# Altium footprint library Package_BGA.PcbLib: 230 footprints (part 14 of 28)
Each footprint in its own frame and in the unit in brackets; x right, y up, seen from the top. Pads: shape width x height; smd on the part's side, far side on the other; paste and mask are expansions set on the pad; w line width, h text height; cw(c..) or ccw(c..) is an arc to the next point about the centre after c.
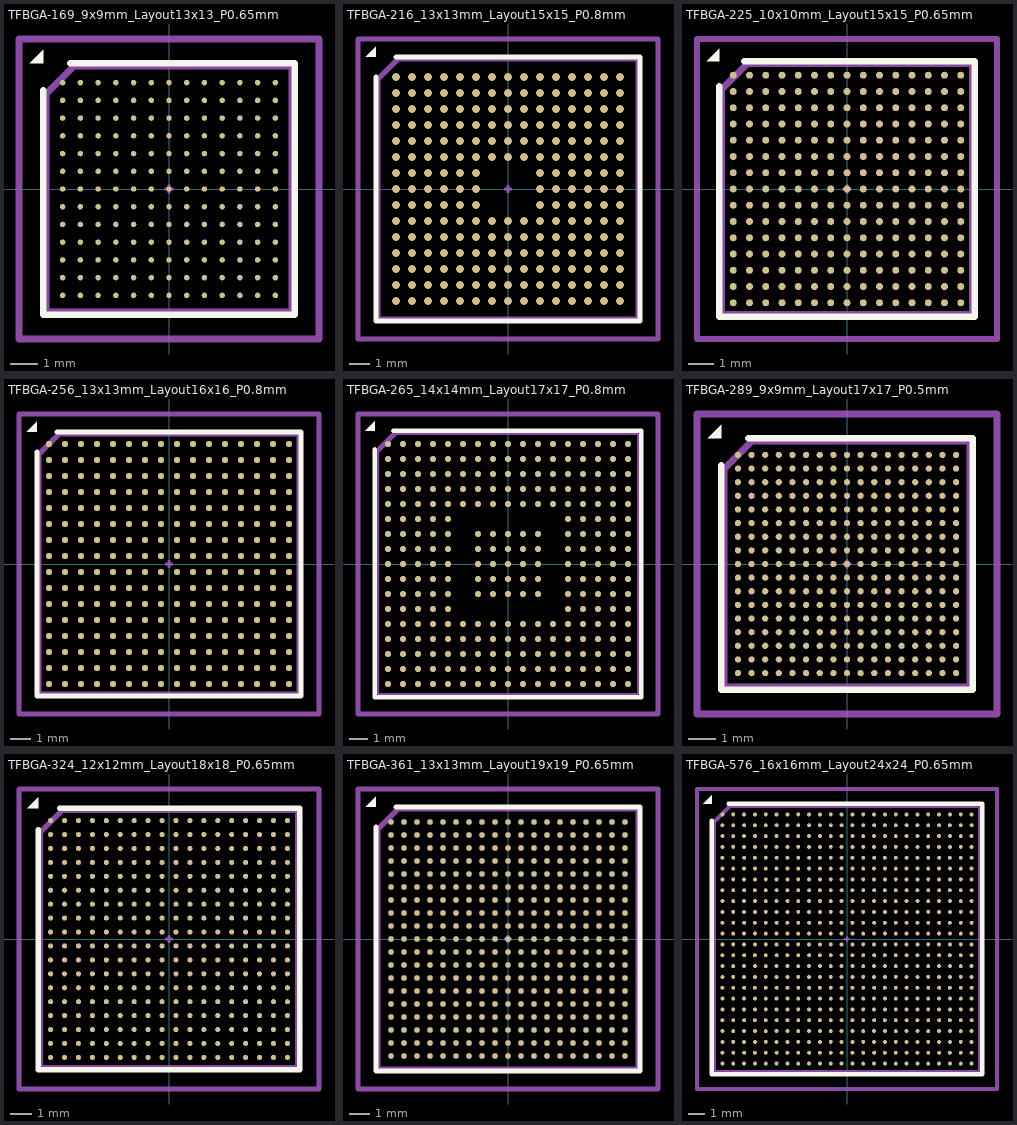
[diagram p13: the footprints below, top view; thin cyan lines are the x and y axes]

## TFBGA-169_9x9mm_Layout13x13_P0.65mm [mm] "TFBGA-169_9x9mm_Layout13x13_P0.65mm"
pads (169):
  round 0.2 smd: A1(-3.9,3.9) A2(-3.25,3.9) A3(-2.6,3.9) A4(-1.95,3.9) A5(-1.3,3.9) A6(-0.65,3.9) A7(0,3.9) A8(0.65,3.9) A9(1.3,3.9) A10(1.95,3.9) A11(2.6,3.9) A12(3.25,3.9) A13(3.9,3.9) B1(-3.9,3.25) B2(-3.25,3.25) B3(-2.6,3.25) B4(-1.95,3.25) B5(-1.3,3.25) B6(-0.65,3.25) B7(0,3.25) B8(0.65,3.25) B9(1.3,3.25) B10(1.95,3.25) B11(2.6,3.25) B12(3.25,3.25) B13(3.9,3.25) C1(-3.9,2.6) C2(-3.25,2.6) C3(-2.6,2.6) C4(-1.95,2.6) C5(-1.3,2.6) C6(-0.65,2.6) C7(0,2.6) C8(0.65,2.6) C9(1.3,2.6) C10(1.95,2.6) C11(2.6,2.6) C12(3.25,2.6) C13(3.9,2.6) D1(-3.9,1.95) D2(-3.25,1.95) D3(-2.6,1.95) D4(-1.95,1.95) D5(-1.3,1.95) D6(-0.65,1.95) D7(0,1.95) D8(0.65,1.95) D9(1.3,1.95) D10(1.95,1.95) D11(2.6,1.95) D12(3.25,1.95) D13(3.9,1.95) E1(-3.9,1.3) E2(-3.25,1.3) E3(-2.6,1.3) E4(-1.95,1.3) E5(-1.3,1.3) E6(-0.65,1.3) E7(0,1.3) E8(0.65,1.3) E9(1.3,1.3) E10(1.95,1.3) E11(2.6,1.3) E12(3.25,1.3) E13(3.9,1.3) F1(-3.9,0.65) F2(-3.25,0.65) F3(-2.6,0.65) F4(-1.95,0.65) F5(-1.3,0.65) F6(-0.65,0.65) F7(0,0.65) F8(0.65,0.65) F9(1.3,0.65) F10(1.95,0.65) F11(2.6,0.65) F12(3.25,0.65) F13(3.9,0.65) G1(-3.9,0) G2(-3.25,0) G3(-2.6,0) G4(-1.95,0) G5(-1.3,0) G6(-0.65,0) G7(0,0) G8(0.65,0) G9(1.3,0) G10(1.95,0) G11(2.6,0) G12(3.25,0) G13(3.9,0) H1(-3.9,-0.65) H2(-3.25,-0.65) H3(-2.6,-0.65) H4(-1.95,-0.65) H5(-1.3,-0.65) H6(-0.65,-0.65) H7(0,-0.65) H8(0.65,-0.65) H9(1.3,-0.65) H10(1.95,-0.65) H11(2.6,-0.65) H12(3.25,-0.65) H13(3.9,-0.65) J1(-3.9,-1.3) J2(-3.25,-1.3) J3(-2.6,-1.3) J4(-1.95,-1.3) J5(-1.3,-1.3) J6(-0.65,-1.3) J7(0,-1.3) J8(0.65,-1.3) J9(1.3,-1.3) J10(1.95,-1.3) J11(2.6,-1.3) J12(3.25,-1.3) J13(3.9,-1.3) K1(-3.9,-1.95) K2(-3.25,-1.95) K3(-2.6,-1.95) K4(-1.95,-1.95) K5(-1.3,-1.95) K6(-0.65,-1.95) K7(0,-1.95) K8(0.65,-1.95) K9(1.3,-1.95) K10(1.95,-1.95) K11(2.6,-1.95) K12(3.25,-1.95) K13(3.9,-1.95) L1(-3.9,-2.6) L2(-3.25,-2.6) L3(-2.6,-2.6) L4(-1.95,-2.6) L5(-1.3,-2.6) L6(-0.65,-2.6) L7(0,-2.6) L8(0.65,-2.6) L9(1.3,-2.6) L10(1.95,-2.6) L11(2.6,-2.6) L12(3.25,-2.6) L13(3.9,-2.6) M1(-3.9,-3.25) M2(-3.25,-3.25) M3(-2.6,-3.25) M4(-1.95,-3.25) M5(-1.3,-3.25) M6(-0.65,-3.25) M7(0,-3.25) M8(0.65,-3.25) M9(1.3,-3.25) M10(1.95,-3.25) M11(2.6,-3.25) M12(3.25,-3.25) M13(3.9,-3.25) N1(-3.9,-3.9) N2(-3.25,-3.9) N3(-2.6,-3.9) N4(-1.95,-3.9) N5(-1.3,-3.9) N6(-0.65,-3.9) N7(0,-3.9) N8(0.65,-3.9) N9(1.3,-3.9) N10(1.95,-3.9) N11(2.6,-3.9) N12(3.25,-3.9) N13(3.9,-3.9)
F.SilkS:
  region: -4.61,4.61 -5.11,4.61 -4.61,5.11
  lines w0.254: -4.61,3.61 -4.61,-4.61 4.61,-4.61 4.61,4.61 -3.61,4.61
Top Component Center:
  lines w0.127: -0.127,0 0.127,0 -0.127,0 ; 0,-0.127 0,0.127 0,-0.127
Top Assembly:
  lines w0.254: -4.5,-4.5 -4.5,3.5 -3.5,4.5 4.5,4.5 4.5,-4.5 -4.5,-4.5
Top Courtyard:
  lines w0.254: -5.5,-5.5 -5.5,5.5 5.5,5.5 5.5,-5.5 -5.5,-5.5
Top Designator:
  text ".Designator" at -3.432,-0.345 h1.52

## TFBGA-216_13x13mm_Layout15x15_P0.8mm [mm] "TFBGA-216_13x13mm_Layout15x15_P0.8mm"
pads (216):
  round 0.4 smd: A1(-5.6,5.6) A2(-4.8,5.6) A3(-4,5.6) A4(-3.2,5.6) A5(-2.4,5.6) A6(-1.6,5.6) A7(-0.8,5.6) A8(0,5.6) A9(0.8,5.6) A10(1.6,5.6) A11(2.4,5.6) A12(3.2,5.6) A13(4,5.6) A14(4.8,5.6) A15(5.6,5.6) B1(-5.6,4.8) B2(-4.8,4.8) B3(-4,4.8) B4(-3.2,4.8) B5(-2.4,4.8) B6(-1.6,4.8) B7(-0.8,4.8) B8(0,4.8) B9(0.8,4.8) B10(1.6,4.8) B11(2.4,4.8) B12(3.2,4.8) B13(4,4.8) B14(4.8,4.8) B15(5.6,4.8) C1(-5.6,4) C2(-4.8,4) C3(-4,4) C4(-3.2,4) C5(-2.4,4) C6(-1.6,4) C7(-0.8,4) C8(0,4) C9(0.8,4) C10(1.6,4) C11(2.4,4) C12(3.2,4) C13(4,4) C14(4.8,4) C15(5.6,4) D1(-5.6,3.2) D2(-4.8,3.2) D3(-4,3.2) D4(-3.2,3.2) D5(-2.4,3.2) D6(-1.6,3.2) D7(-0.8,3.2) D8(0,3.2) D9(0.8,3.2) D10(1.6,3.2) D11(2.4,3.2) D12(3.2,3.2) D13(4,3.2) D14(4.8,3.2) D15(5.6,3.2) E1(-5.6,2.4) E2(-4.8,2.4) E3(-4,2.4) E4(-3.2,2.4) E5(-2.4,2.4) E6(-1.6,2.4) E7(-0.8,2.4) E8(0,2.4) E9(0.8,2.4) E10(1.6,2.4) E11(2.4,2.4) E12(3.2,2.4) E13(4,2.4) E14(4.8,2.4) E15(5.6,2.4) F1(-5.6,1.6) F2(-4.8,1.6) F3(-4,1.6) F4(-3.2,1.6) F5(-2.4,1.6) F6(-1.6,1.6) F7(-0.8,1.6) F8(0,1.6) F9(0.8,1.6) F10(1.6,1.6) F11(2.4,1.6) F12(3.2,1.6) F13(4,1.6) F14(4.8,1.6) F15(5.6,1.6) G1(-5.6,0.8) G2(-4.8,0.8) G3(-4,0.8) G4(-3.2,0.8) G5(-2.4,0.8) G6(-1.6,0.8) G10(1.6,0.8) G11(2.4,0.8) G12(3.2,0.8) G13(4,0.8) G14(4.8,0.8) G15(5.6,0.8) H1(-5.6,0) H2(-4.8,0) H3(-4,0) H4(-3.2,0) H5(-2.4,0) H6(-1.6,0) H10(1.6,0) H11(2.4,0) H12(3.2,0) H13(4,0) H14(4.8,0) H15(5.6,0) J1(-5.6,-0.8) J2(-4.8,-0.8) J3(-4,-0.8) J4(-3.2,-0.8) J5(-2.4,-0.8) J6(-1.6,-0.8) J10(1.6,-0.8) J11(2.4,-0.8) J12(3.2,-0.8) J13(4,-0.8) J14(4.8,-0.8) J15(5.6,-0.8) K1(-5.6,-1.6) K2(-4.8,-1.6) K3(-4,-1.6) K4(-3.2,-1.6) K5(-2.4,-1.6) K6(-1.6,-1.6) K7(-0.8,-1.6) K8(0,-1.6) K9(0.8,-1.6) K10(1.6,-1.6) K11(2.4,-1.6) K12(3.2,-1.6) K13(4,-1.6) K14(4.8,-1.6) K15(5.6,-1.6) L1(-5.6,-2.4) L2(-4.8,-2.4) L3(-4,-2.4) L4(-3.2,-2.4) L5(-2.4,-2.4) L6(-1.6,-2.4) L7(-0.8,-2.4) L8(0,-2.4) L9(0.8,-2.4) L10(1.6,-2.4) L11(2.4,-2.4) L12(3.2,-2.4) L13(4,-2.4) L14(4.8,-2.4) L15(5.6,-2.4) M1(-5.6,-3.2) M2(-4.8,-3.2) M3(-4,-3.2) M4(-3.2,-3.2) M5(-2.4,-3.2) M6(-1.6,-3.2) M7(-0.8,-3.2) M8(0,-3.2) M9(0.8,-3.2) M10(1.6,-3.2) M11(2.4,-3.2) M12(3.2,-3.2) M13(4,-3.2) M14(4.8,-3.2) M15(5.6,-3.2) N1(-5.6,-4) N2(-4.8,-4) N3(-4,-4) N4(-3.2,-4) N5(-2.4,-4) N6(-1.6,-4) N7(-0.8,-4) N8(0,-4) N9(0.8,-4) N10(1.6,-4) N11(2.4,-4) N12(3.2,-4) N13(4,-4) N14(4.8,-4) N15(5.6,-4) P1(-5.6,-4.8) P2(-4.8,-4.8) P3(-4,-4.8) P4(-3.2,-4.8) P5(-2.4,-4.8) P6(-1.6,-4.8) P7(-0.8,-4.8) P8(0,-4.8) P9(0.8,-4.8) P10(1.6,-4.8) P11(2.4,-4.8) P12(3.2,-4.8) P13(4,-4.8) P14(4.8,-4.8) P15(5.6,-4.8) R1(-5.6,-5.6) R2(-4.8,-5.6) R3(-4,-5.6) R4(-3.2,-5.6) R5(-2.4,-5.6) R6(-1.6,-5.6) R7(-0.8,-5.6) R8(0,-5.6) R9(0.8,-5.6) R10(1.6,-5.6) R11(2.4,-5.6) R12(3.2,-5.6) R13(4,-5.6) R14(4.8,-5.6) R15(5.6,-5.6)
F.SilkS:
  region: -6.61,6.61 -7.11,6.61 -6.61,7.11
  lines w0.254: -6.61,5.61 -6.61,-6.61 6.61,-6.61 6.61,6.61 -5.61,6.61
Top Component Center:
  lines w0.127: -0.127,0 0.127,0 -0.127,0 ; 0,-0.127 0,0.127 0,-0.127
Top Assembly:
  lines w0.254: -6.5,-6.5 -6.5,5.5 -5.5,6.5 6.5,6.5 6.5,-6.5 -6.5,-6.5
Top Courtyard:
  lines w0.254: -7.5,-7.5 -7.5,7.5 7.5,7.5 7.5,-7.5 -7.5,-7.5
Top Designator:
  text ".Designator" at -3.432,-0.345 h1.52
3D body "TFBGA-216_13x13mm_Layout15x15_P0.8mm.step": height 1.1, standoff -0.01, extent -6.5,-6.5 6.5,6.5
3D body "TFBGA-216_13x13mm_Layout15x15_P0.8mm.step": height 1.1, standoff -0.01, extent -6.5,-6.5 6.5,6.5

## TFBGA-225_10x10mm_Layout15x15_P0.65mm [mm] "TFBGA-225_10x10mm_Layout15x15_P0.65mm"
pads (225):
  round 0.28 smd: A1(-4.55,4.55) A2(-3.9,4.55) A3(-3.25,4.55) A4(-2.6,4.55) A5(-1.95,4.55) A6(-1.3,4.55) A7(-0.65,4.55) A8(0,4.55) A9(0.65,4.55) A10(1.3,4.55) A11(1.95,4.55) A12(2.6,4.55) A13(3.25,4.55) A14(3.9,4.55) A15(4.55,4.55) B1(-4.55,3.9) B2(-3.9,3.9) B3(-3.25,3.9) B4(-2.6,3.9) B5(-1.95,3.9) B6(-1.3,3.9) B7(-0.65,3.9) B8(0,3.9) B9(0.65,3.9) B10(1.3,3.9) B11(1.95,3.9) B12(2.6,3.9) B13(3.25,3.9) B14(3.9,3.9) B15(4.55,3.9) C1(-4.55,3.25) C2(-3.9,3.25) C3(-3.25,3.25) C4(-2.6,3.25) C5(-1.95,3.25) C6(-1.3,3.25) C7(-0.65,3.25) C8(0,3.25) C9(0.65,3.25) C10(1.3,3.25) C11(1.95,3.25) C12(2.6,3.25) C13(3.25,3.25) C14(3.9,3.25) C15(4.55,3.25) D1(-4.55,2.6) D2(-3.9,2.6) D3(-3.25,2.6) D4(-2.6,2.6) D5(-1.95,2.6) D6(-1.3,2.6) D7(-0.65,2.6) D8(0,2.6) D9(0.65,2.6) D10(1.3,2.6) D11(1.95,2.6) D12(2.6,2.6) D13(3.25,2.6) D14(3.9,2.6) D15(4.55,2.6) E1(-4.55,1.95) E2(-3.9,1.95) E3(-3.25,1.95) E4(-2.6,1.95) E5(-1.95,1.95) E6(-1.3,1.95) E7(-0.65,1.95) E8(0,1.95) E9(0.65,1.95) E10(1.3,1.95) E11(1.95,1.95) E12(2.6,1.95) E13(3.25,1.95) E14(3.9,1.95) E15(4.55,1.95) F1(-4.55,1.3) F2(-3.9,1.3) F3(-3.25,1.3) F4(-2.6,1.3) F5(-1.95,1.3) F6(-1.3,1.3) F7(-0.65,1.3) F8(0,1.3) F9(0.65,1.3) F10(1.3,1.3) F11(1.95,1.3) F12(2.6,1.3) F13(3.25,1.3) F14(3.9,1.3) F15(4.55,1.3) G1(-4.55,0.65) G2(-3.9,0.65) G3(-3.25,0.65) G4(-2.6,0.65) G5(-1.95,0.65) G6(-1.3,0.65) G7(-0.65,0.65) G8(0,0.65) G9(0.65,0.65) G10(1.3,0.65) G11(1.95,0.65) G12(2.6,0.65) G13(3.25,0.65) G14(3.9,0.65) G15(4.55,0.65) H1(-4.55,0) H2(-3.9,0) H3(-3.25,0) H4(-2.6,0) H5(-1.95,0) H6(-1.3,0) H7(-0.65,0) H8(0,0) H9(0.65,0) H10(1.3,0) H11(1.95,0) H12(2.6,0) H13(3.25,0) H14(3.9,0) H15(4.55,0) J1(-4.55,-0.65) J2(-3.9,-0.65) J3(-3.25,-0.65) J4(-2.6,-0.65) J5(-1.95,-0.65) J6(-1.3,-0.65) J7(-0.65,-0.65) J8(0,-0.65) J9(0.65,-0.65) J10(1.3,-0.65) J11(1.95,-0.65) J12(2.6,-0.65) J13(3.25,-0.65) J14(3.9,-0.65) J15(4.55,-0.65) K1(-4.55,-1.3) K2(-3.9,-1.3) K3(-3.25,-1.3) K4(-2.6,-1.3) K5(-1.95,-1.3) K6(-1.3,-1.3) K7(-0.65,-1.3) K8(0,-1.3) K9(0.65,-1.3) K10(1.3,-1.3) K11(1.95,-1.3) K12(2.6,-1.3) K13(3.25,-1.3) K14(3.9,-1.3) K15(4.55,-1.3) L1(-4.55,-1.95) L2(-3.9,-1.95) L3(-3.25,-1.95) L4(-2.6,-1.95) L5(-1.95,-1.95) L6(-1.3,-1.95) L7(-0.65,-1.95) L8(0,-1.95) L9(0.65,-1.95) L10(1.3,-1.95) L11(1.95,-1.95) L12(2.6,-1.95) L13(3.25,-1.95) L14(3.9,-1.95) L15(4.55,-1.95) M1(-4.55,-2.6) M2(-3.9,-2.6) M3(-3.25,-2.6) M4(-2.6,-2.6) M5(-1.95,-2.6) M6(-1.3,-2.6) M7(-0.65,-2.6) M8(0,-2.6) M9(0.65,-2.6) M10(1.3,-2.6) M11(1.95,-2.6) M12(2.6,-2.6) M13(3.25,-2.6) M14(3.9,-2.6) M15(4.55,-2.6) N1(-4.55,-3.25) N2(-3.9,-3.25) N3(-3.25,-3.25) N4(-2.6,-3.25) N5(-1.95,-3.25) N6(-1.3,-3.25) N7(-0.65,-3.25) N8(0,-3.25) N9(0.65,-3.25) N10(1.3,-3.25) N11(1.95,-3.25) N12(2.6,-3.25) N13(3.25,-3.25) N14(3.9,-3.25) N15(4.55,-3.25) P1(-4.55,-3.9) P2(-3.9,-3.9) P3(-3.25,-3.9) P4(-2.6,-3.9) P5(-1.95,-3.9) P6(-1.3,-3.9) P7(-0.65,-3.9) P8(0,-3.9) P9(0.65,-3.9) P10(1.3,-3.9) P11(1.95,-3.9) P12(2.6,-3.9) P13(3.25,-3.9) P14(3.9,-3.9) P15(4.55,-3.9) R1(-4.55,-4.55) R2(-3.9,-4.55) R3(-3.25,-4.55) R4(-2.6,-4.55) R5(-1.95,-4.55) R6(-1.3,-4.55) R7(-0.65,-4.55) R8(0,-4.55) R9(0.65,-4.55) R10(1.3,-4.55) R11(1.95,-4.55) R12(2.6,-4.55) R13(3.25,-4.55) R14(3.9,-4.55) R15(4.55,-4.55)
F.SilkS:
  region: -5.11,5.11 -5.61,5.11 -5.11,5.61
  lines w0.254: -5.11,4.11 -5.11,-5.11 5.11,-5.11 5.11,5.11 -4.11,5.11
Top Component Center:
  lines w0.127: -0.127,0 0.127,0 -0.127,0 ; 0,-0.127 0,0.127 0,-0.127
Top Assembly:
  lines w0.254: -5,-5 -5,4 -4,5 5,5 5,-5 -5,-5
Top Courtyard:
  lines w0.254: -6,-6 -6,6 6,6 6,-6 -6,-6
Top Designator:
  text ".Designator" at -3.432,-0.345 h1.52

## TFBGA-256_13x13mm_Layout16x16_P0.8mm [mm] "TFBGA-256_13x13mm_Layout16x16_P0.8mm"
pads (256):
  round 0.32 smd: A1(-6,6) A2(-5.2,6) A3(-4.4,6) A4(-3.6,6) A5(-2.8,6) A6(-2,6) A7(-1.2,6) A8(-0.4,6) A9(0.4,6) A10(1.2,6) A11(2,6) A12(2.8,6) A13(3.6,6) A14(4.4,6) A15(5.2,6) A16(6,6) B1(-6,5.2) B2(-5.2,5.2) B3(-4.4,5.2) B4(-3.6,5.2) B5(-2.8,5.2) B6(-2,5.2) B7(-1.2,5.2) B8(-0.4,5.2) B9(0.4,5.2) B10(1.2,5.2) B11(2,5.2) B12(2.8,5.2) B13(3.6,5.2) B14(4.4,5.2) B15(5.2,5.2) B16(6,5.2) C1(-6,4.4) C2(-5.2,4.4) C3(-4.4,4.4) C4(-3.6,4.4) C5(-2.8,4.4) C6(-2,4.4) C7(-1.2,4.4) C8(-0.4,4.4) C9(0.4,4.4) C10(1.2,4.4) C11(2,4.4) C12(2.8,4.4) C13(3.6,4.4) C14(4.4,4.4) C15(5.2,4.4) C16(6,4.4) D1(-6,3.6) D2(-5.2,3.6) D3(-4.4,3.6) D4(-3.6,3.6) D5(-2.8,3.6) D6(-2,3.6) D7(-1.2,3.6) D8(-0.4,3.6) D9(0.4,3.6) D10(1.2,3.6) D11(2,3.6) D12(2.8,3.6) D13(3.6,3.6) D14(4.4,3.6) D15(5.2,3.6) D16(6,3.6) E1(-6,2.8) E2(-5.2,2.8) E3(-4.4,2.8) E4(-3.6,2.8) E5(-2.8,2.8) E6(-2,2.8) E7(-1.2,2.8) E8(-0.4,2.8) E9(0.4,2.8) E10(1.2,2.8) E11(2,2.8) E12(2.8,2.8) E13(3.6,2.8) E14(4.4,2.8) E15(5.2,2.8) E16(6,2.8) F1(-6,2) F2(-5.2,2) F3(-4.4,2) F4(-3.6,2) F5(-2.8,2) F6(-2,2) F7(-1.2,2) F8(-0.4,2) F9(0.4,2) F10(1.2,2) F11(2,2) F12(2.8,2) F13(3.6,2) F14(4.4,2) F15(5.2,2) F16(6,2) G1(-6,1.2) G2(-5.2,1.2) G3(-4.4,1.2) G4(-3.6,1.2) G5(-2.8,1.2) G6(-2,1.2) G7(-1.2,1.2) G8(-0.4,1.2) G9(0.4,1.2) G10(1.2,1.2) G11(2,1.2) G12(2.8,1.2) G13(3.6,1.2) G14(4.4,1.2) G15(5.2,1.2) G16(6,1.2) H1(-6,0.4) H2(-5.2,0.4) H3(-4.4,0.4) H4(-3.6,0.4) H5(-2.8,0.4) H6(-2,0.4) H7(-1.2,0.4) H8(-0.4,0.4) H9(0.4,0.4) H10(1.2,0.4) H11(2,0.4) H12(2.8,0.4) H13(3.6,0.4) H14(4.4,0.4) H15(5.2,0.4) H16(6,0.4) J1(-6,-0.4) J2(-5.2,-0.4) J3(-4.4,-0.4) J4(-3.6,-0.4) J5(-2.8,-0.4) J6(-2,-0.4) J7(-1.2,-0.4) J8(-0.4,-0.4) J9(0.4,-0.4) J10(1.2,-0.4) J11(2,-0.4) J12(2.8,-0.4) J13(3.6,-0.4) J14(4.4,-0.4) J15(5.2,-0.4) J16(6,-0.4) K1(-6,-1.2) K2(-5.2,-1.2) K3(-4.4,-1.2) K4(-3.6,-1.2) K5(-2.8,-1.2) K6(-2,-1.2) K7(-1.2,-1.2) K8(-0.4,-1.2) K9(0.4,-1.2) K10(1.2,-1.2) K11(2,-1.2) K12(2.8,-1.2) K13(3.6,-1.2) K14(4.4,-1.2) K15(5.2,-1.2) K16(6,-1.2) L1(-6,-2) L2(-5.2,-2) L3(-4.4,-2) L4(-3.6,-2) L5(-2.8,-2) L6(-2,-2) L7(-1.2,-2) L8(-0.4,-2) L9(0.4,-2) L10(1.2,-2) L11(2,-2) L12(2.8,-2) L13(3.6,-2) L14(4.4,-2) L15(5.2,-2) L16(6,-2) M1(-6,-2.8) M2(-5.2,-2.8) M3(-4.4,-2.8) M4(-3.6,-2.8) M5(-2.8,-2.8) M6(-2,-2.8) M7(-1.2,-2.8) M8(-0.4,-2.8) M9(0.4,-2.8) M10(1.2,-2.8) M11(2,-2.8) M12(2.8,-2.8) M13(3.6,-2.8) M14(4.4,-2.8) M15(5.2,-2.8) M16(6,-2.8) N1(-6,-3.6) N2(-5.2,-3.6) N3(-4.4,-3.6) N4(-3.6,-3.6) N5(-2.8,-3.6) N6(-2,-3.6) N7(-1.2,-3.6) N8(-0.4,-3.6) N9(0.4,-3.6) N10(1.2,-3.6) N11(2,-3.6) N12(2.8,-3.6) N13(3.6,-3.6) N14(4.4,-3.6) N15(5.2,-3.6) N16(6,-3.6) P1(-6,-4.4) P2(-5.2,-4.4) P3(-4.4,-4.4) P4(-3.6,-4.4) P5(-2.8,-4.4) P6(-2,-4.4) P7(-1.2,-4.4) P8(-0.4,-4.4) P9(0.4,-4.4) P10(1.2,-4.4) P11(2,-4.4) P12(2.8,-4.4) P13(3.6,-4.4) P14(4.4,-4.4) P15(5.2,-4.4) P16(6,-4.4) R1(-6,-5.2) R2(-5.2,-5.2) R3(-4.4,-5.2) R4(-3.6,-5.2) R5(-2.8,-5.2) R6(-2,-5.2) R7(-1.2,-5.2) R8(-0.4,-5.2) R9(0.4,-5.2) R10(1.2,-5.2) R11(2,-5.2) R12(2.8,-5.2) R13(3.6,-5.2) R14(4.4,-5.2) R15(5.2,-5.2) R16(6,-5.2) T1(-6,-6) T2(-5.2,-6) T3(-4.4,-6) T4(-3.6,-6) T5(-2.8,-6) T6(-2,-6) T7(-1.2,-6) T8(-0.4,-6) T9(0.4,-6) T10(1.2,-6) T11(2,-6) T12(2.8,-6) T13(3.6,-6) T14(4.4,-6) T15(5.2,-6) T16(6,-6)
F.SilkS:
  region: -6.61,6.61 -7.11,6.61 -6.61,7.11
  lines w0.254: -6.61,5.61 -6.61,-6.61 6.61,-6.61 6.61,6.61 -5.61,6.61
Top Component Center:
  lines w0.127: -0.127,0 0.127,0 -0.127,0 ; 0,-0.127 0,0.127 0,-0.127
Top Assembly:
  lines w0.254: -6.5,-6.5 -6.5,5.5 -5.5,6.5 6.5,6.5 6.5,-6.5 -6.5,-6.5
Top Courtyard:
  lines w0.254: -7.5,-7.5 -7.5,7.5 7.5,7.5 7.5,-7.5 -7.5,-7.5
Top Designator:
  text ".Designator" at -3.432,-0.345 h1.52

## TFBGA-265_14x14mm_Layout17x17_P0.8mm [mm] "TFBGA-265_14x14mm_Layout17x17_P0.8mm"
pads (265):
  round 0.325 smd: A1(-6.4,6.4) A2(-5.6,6.4) A3(-4.8,6.4) A4(-4,6.4) A5(-3.2,6.4) A6(-2.4,6.4) A7(-1.6,6.4) A8(-0.8,6.4) A9(0,6.4) A10(0.8,6.4) A11(1.6,6.4) A12(2.4,6.4) A13(3.2,6.4) A14(4,6.4) A15(4.8,6.4) A16(5.6,6.4) A17(6.4,6.4) B1(-6.4,5.6) B2(-5.6,5.6) B3(-4.8,5.6) B4(-4,5.6) B5(-3.2,5.6) B6(-2.4,5.6) B7(-1.6,5.6) B8(-0.8,5.6) B9(0,5.6) B10(0.8,5.6) B11(1.6,5.6) B12(2.4,5.6) B13(3.2,5.6) B14(4,5.6) B15(4.8,5.6) B16(5.6,5.6) B17(6.4,5.6) C1(-6.4,4.8) C2(-5.6,4.8) C3(-4.8,4.8) C4(-4,4.8) C5(-3.2,4.8) C6(-2.4,4.8) C7(-1.6,4.8) C8(-0.8,4.8) C9(0,4.8) C10(0.8,4.8) C11(1.6,4.8) C12(2.4,4.8) C13(3.2,4.8) C14(4,4.8) C15(4.8,4.8) C16(5.6,4.8) C17(6.4,4.8) D1(-6.4,4) D2(-5.6,4) D3(-4.8,4) D4(-4,4) D5(-3.2,4) D6(-2.4,4) D7(-1.6,4) D8(-0.8,4) D9(0,4) D10(0.8,4) D11(1.6,4) D12(2.4,4) D13(3.2,4) D14(4,4) D15(4.8,4) D16(5.6,4) D17(6.4,4) E1(-6.4,3.2) E2(-5.6,3.2) E3(-4.8,3.2) E4(-4,3.2) E5(-3.2,3.2) E6(-2.4,3.2) E7(-1.6,3.2) E8(-0.8,3.2) E9(0,3.2) E10(0.8,3.2) E11(1.6,3.2) E12(2.4,3.2) E13(3.2,3.2) E14(4,3.2) E15(4.8,3.2) E16(5.6,3.2) E17(6.4,3.2) F1(-6.4,2.4) F2(-5.6,2.4) F3(-4.8,2.4) F4(-4,2.4) F5(-3.2,2.4) F13(3.2,2.4) F14(4,2.4) F15(4.8,2.4) F16(5.6,2.4) F17(6.4,2.4) G1(-6.4,1.6) G2(-5.6,1.6) G3(-4.8,1.6) G4(-4,1.6) G5(-3.2,1.6) G7(-1.6,1.6) G8(-0.8,1.6) G9(0,1.6) G10(0.8,1.6) G11(1.6,1.6) G13(3.2,1.6) G14(4,1.6) G15(4.8,1.6) G16(5.6,1.6) G17(6.4,1.6) H1(-6.4,0.8) H2(-5.6,0.8) H3(-4.8,0.8) H4(-4,0.8) H5(-3.2,0.8) H7(-1.6,0.8) H8(-0.8,0.8) H9(0,0.8) H10(0.8,0.8) H11(1.6,0.8) H13(3.2,0.8) H14(4,0.8) H15(4.8,0.8) H16(5.6,0.8) H17(6.4,0.8) J1(-6.4,0) J2(-5.6,0) J3(-4.8,0) J4(-4,0) J5(-3.2,0) J7(-1.6,0) J8(-0.8,0) J9(0,0) J10(0.8,0) J11(1.6,0) J13(3.2,0) J14(4,0) J15(4.8,0) J16(5.6,0) J17(6.4,0) K1(-6.4,-0.8) K2(-5.6,-0.8) K3(-4.8,-0.8) K4(-4,-0.8) K5(-3.2,-0.8) K7(-1.6,-0.8) K8(-0.8,-0.8) K9(0,-0.8) K10(0.8,-0.8) K11(1.6,-0.8) K13(3.2,-0.8) K14(4,-0.8) K15(4.8,-0.8) K16(5.6,-0.8) K17(6.4,-0.8) L1(-6.4,-1.6) L2(-5.6,-1.6) L3(-4.8,-1.6) L4(-4,-1.6) L5(-3.2,-1.6) L7(-1.6,-1.6) L8(-0.8,-1.6) L9(0,-1.6) L10(0.8,-1.6) L11(1.6,-1.6) L13(3.2,-1.6) L14(4,-1.6) L15(4.8,-1.6) L16(5.6,-1.6) L17(6.4,-1.6) M1(-6.4,-2.4) M2(-5.6,-2.4) M3(-4.8,-2.4) M4(-4,-2.4) M5(-3.2,-2.4) M13(3.2,-2.4) M14(4,-2.4) M15(4.8,-2.4) M16(5.6,-2.4) M17(6.4,-2.4) N1(-6.4,-3.2) N2(-5.6,-3.2) N3(-4.8,-3.2) N4(-4,-3.2) N5(-3.2,-3.2) N6(-2.4,-3.2) N7(-1.6,-3.2) N8(-0.8,-3.2) N9(0,-3.2) N10(0.8,-3.2) N11(1.6,-3.2) N12(2.4,-3.2) N13(3.2,-3.2) N14(4,-3.2) N15(4.8,-3.2) N16(5.6,-3.2) N17(6.4,-3.2) P1(-6.4,-4) P2(-5.6,-4) P3(-4.8,-4) P4(-4,-4) P5(-3.2,-4) P6(-2.4,-4) P7(-1.6,-4) P8(-0.8,-4) P9(0,-4) P10(0.8,-4) P11(1.6,-4) P12(2.4,-4) P13(3.2,-4) P14(4,-4) P15(4.8,-4) P16(5.6,-4) P17(6.4,-4) R1(-6.4,-4.8) R2(-5.6,-4.8) R3(-4.8,-4.8) R4(-4,-4.8) R5(-3.2,-4.8) R6(-2.4,-4.8) R7(-1.6,-4.8) R8(-0.8,-4.8) R9(0,-4.8) R10(0.8,-4.8) R11(1.6,-4.8) R12(2.4,-4.8) R13(3.2,-4.8) R14(4,-4.8) R15(4.8,-4.8) R16(5.6,-4.8) R17(6.4,-4.8) T1(-6.4,-5.6) T2(-5.6,-5.6) T3(-4.8,-5.6) T4(-4,-5.6) T5(-3.2,-5.6) T6(-2.4,-5.6) T7(-1.6,-5.6) T8(-0.8,-5.6) T9(0,-5.6) T10(0.8,-5.6) T11(1.6,-5.6) T12(2.4,-5.6) T13(3.2,-5.6) T14(4,-5.6) T15(4.8,-5.6) T16(5.6,-5.6) T17(6.4,-5.6) U1(-6.4,-6.4) U2(-5.6,-6.4) U3(-4.8,-6.4) U4(-4,-6.4) U5(-3.2,-6.4) U6(-2.4,-6.4) U7(-1.6,-6.4) U8(-0.8,-6.4) U9(0,-6.4) U10(0.8,-6.4) U11(1.6,-6.4) U12(2.4,-6.4) U13(3.2,-6.4) U14(4,-6.4) U15(4.8,-6.4) U16(5.6,-6.4) U17(6.4,-6.4)
F.SilkS:
  region: -7.11,7.11 -7.61,7.11 -7.11,7.61
  lines w0.254: -7.11,6.11 -7.11,-7.11 7.11,-7.11 7.11,7.11 -6.11,7.11
Top Component Center:
  lines w0.127: -0.127,0 0.127,0 -0.127,0 ; 0,-0.127 0,0.127 0,-0.127
Top Assembly:
  lines w0.254: -7,-7 7,-7 7,7 -6,7 -7,6 -7,-7
Top Courtyard:
  lines w0.254: -8,-8 8,-8 8,8 -8,8 -8,-8
Top Designator:
  text ".Designator" at -3.432,-0.345 h1.52
3D body "TFBGA-265_14x14mm_Layout17x17_P0.8mm.step": height 1.1, standoff -0.01, extent -7,-7 7,7
3D body "TFBGA-265_14x14mm_Layout17x17_P0.8mm.step": height 1.1, standoff -0.01, extent -7,-7 7,7

## TFBGA-289_9x9mm_Layout17x17_P0.5mm [mm] "TFBGA-289_9x9mm_Layout17x17_P0.5mm"
pads (289):
  round 0.23 smd: A1(-4,4) A2(-3.5,4) A3(-3,4) A4(-2.5,4) A5(-2,4) A6(-1.5,4) A7(-1,4) A8(-0.5,4) A9(0,4) A10(0.5,4) A11(1,4) A12(1.5,4) A13(2,4) A14(2.5,4) A15(3,4) A16(3.5,4) A17(4,4) B1(-4,3.5) B2(-3.5,3.5) B3(-3,3.5) B4(-2.5,3.5) B5(-2,3.5) B6(-1.5,3.5) B7(-1,3.5) B8(-0.5,3.5) B9(0,3.5) B10(0.5,3.5) B11(1,3.5) B12(1.5,3.5) B13(2,3.5) B14(2.5,3.5) B15(3,3.5) B16(3.5,3.5) B17(4,3.5) C1(-4,3) C2(-3.5,3) C3(-3,3) C4(-2.5,3) C5(-2,3) C6(-1.5,3) C7(-1,3) C8(-0.5,3) C9(0,3) C10(0.5,3) C11(1,3) C12(1.5,3) C13(2,3) C14(2.5,3) C15(3,3) C16(3.5,3) C17(4,3) D1(-4,2.5) D2(-3.5,2.5) D3(-3,2.5) D4(-2.5,2.5) D5(-2,2.5) D6(-1.5,2.5) D7(-1,2.5) D8(-0.5,2.5) D9(0,2.5) D10(0.5,2.5) D11(1,2.5) D12(1.5,2.5) D13(2,2.5) D14(2.5,2.5) D15(3,2.5) D16(3.5,2.5) D17(4,2.5) E1(-4,2) E2(-3.5,2) E3(-3,2) E4(-2.5,2) E5(-2,2) E6(-1.5,2) E7(-1,2) E8(-0.5,2) E9(0,2) E10(0.5,2) E11(1,2) E12(1.5,2) E13(2,2) E14(2.5,2) E15(3,2) E16(3.5,2) E17(4,2) F1(-4,1.5) F2(-3.5,1.5) F3(-3,1.5) F4(-2.5,1.5) F5(-2,1.5) F6(-1.5,1.5) F7(-1,1.5) F8(-0.5,1.5) F9(0,1.5) F10(0.5,1.5) F11(1,1.5) F12(1.5,1.5) F13(2,1.5) F14(2.5,1.5) F15(3,1.5) F16(3.5,1.5) F17(4,1.5) G1(-4,1) G2(-3.5,1) G3(-3,1) G4(-2.5,1) G5(-2,1) G6(-1.5,1) G7(-1,1) G8(-0.5,1) G9(0,1) G10(0.5,1) G11(1,1) G12(1.5,1) G13(2,1) G14(2.5,1) G15(3,1) G16(3.5,1) G17(4,1) H1(-4,0.5) H2(-3.5,0.5) H3(-3,0.5) H4(-2.5,0.5) H5(-2,0.5) H6(-1.5,0.5) H7(-1,0.5) H8(-0.5,0.5) H9(0,0.5) H10(0.5,0.5) H11(1,0.5) H12(1.5,0.5) H13(2,0.5) H14(2.5,0.5) H15(3,0.5) H16(3.5,0.5) H17(4,0.5) J1(-4,0) J2(-3.5,0) J3(-3,0) J4(-2.5,0) J5(-2,0) J6(-1.5,0) J7(-1,0) J8(-0.5,0) J9(0,0) J10(0.5,0) J11(1,0) J12(1.5,0) J13(2,0) J14(2.5,0) J15(3,0) J16(3.5,0) J17(4,0) K1(-4,-0.5) K2(-3.5,-0.5) K3(-3,-0.5) K4(-2.5,-0.5) K5(-2,-0.5) K6(-1.5,-0.5) K7(-1,-0.5) K8(-0.5,-0.5) K9(0,-0.5) K10(0.5,-0.5) K11(1,-0.5) K12(1.5,-0.5) K13(2,-0.5) K14(2.5,-0.5) K15(3,-0.5) K16(3.5,-0.5) K17(4,-0.5) L1(-4,-1) L2(-3.5,-1) L3(-3,-1) L4(-2.5,-1) L5(-2,-1) L6(-1.5,-1) L7(-1,-1) L8(-0.5,-1) L9(0,-1) L10(0.5,-1) L11(1,-1) L12(1.5,-1) L13(2,-1) L14(2.5,-1) L15(3,-1) L16(3.5,-1) L17(4,-1) M1(-4,-1.5) M2(-3.5,-1.5) M3(-3,-1.5) M4(-2.5,-1.5) M5(-2,-1.5) M6(-1.5,-1.5) M7(-1,-1.5) M8(-0.5,-1.5) M9(0,-1.5) M10(0.5,-1.5) M11(1,-1.5) M12(1.5,-1.5) M13(2,-1.5) M14(2.5,-1.5) M15(3,-1.5) M16(3.5,-1.5) M17(4,-1.5) N1(-4,-2) N2(-3.5,-2) N3(-3,-2) N4(-2.5,-2) N5(-2,-2) N6(-1.5,-2) N7(-1,-2) N8(-0.5,-2) N9(0,-2) N10(0.5,-2) N11(1,-2) N12(1.5,-2) N13(2,-2) N14(2.5,-2) N15(3,-2) N16(3.5,-2) N17(4,-2) P1(-4,-2.5) P2(-3.5,-2.5) P3(-3,-2.5) P4(-2.5,-2.5) P5(-2,-2.5) P6(-1.5,-2.5) P7(-1,-2.5) P8(-0.5,-2.5) P9(0,-2.5) P10(0.5,-2.5) P11(1,-2.5) P12(1.5,-2.5) P13(2,-2.5) P14(2.5,-2.5) P15(3,-2.5) P16(3.5,-2.5) P17(4,-2.5) R1(-4,-3) R2(-3.5,-3) R3(-3,-3) R4(-2.5,-3) R5(-2,-3) R6(-1.5,-3) R7(-1,-3) R8(-0.5,-3) R9(0,-3) R10(0.5,-3) R11(1,-3) R12(1.5,-3) R13(2,-3) R14(2.5,-3) R15(3,-3) R16(3.5,-3) R17(4,-3) T1(-4,-3.5) T2(-3.5,-3.5) T3(-3,-3.5) T4(-2.5,-3.5) T5(-2,-3.5) T6(-1.5,-3.5) T7(-1,-3.5) T8(-0.5,-3.5) T9(0,-3.5) T10(0.5,-3.5) T11(1,-3.5) T12(1.5,-3.5) T13(2,-3.5) T14(2.5,-3.5) T15(3,-3.5) T16(3.5,-3.5) T17(4,-3.5) U1(-4,-4) U2(-3.5,-4) U3(-3,-4) U4(-2.5,-4) U5(-2,-4) U6(-1.5,-4) U7(-1,-4) U8(-0.5,-4) U9(0,-4) U10(0.5,-4) U11(1,-4) U12(1.5,-4) U13(2,-4) U14(2.5,-4) U15(3,-4) U16(3.5,-4) U17(4,-4)
F.SilkS:
  region: -4.61,4.61 -5.11,4.61 -4.61,5.11
  lines w0.254: -4.61,3.61 -4.61,-4.61 4.61,-4.61 4.61,4.61 -3.61,4.61
Top Component Center:
  lines w0.127: -0.127,0 0.127,0 -0.127,0 ; 0,-0.127 0,0.127 0,-0.127
Top Assembly:
  lines w0.254: -4.5,-4.5 4.5,-4.5 4.5,4.5 -3.5,4.5 -4.5,3.5 -4.5,-4.5
Top Courtyard:
  lines w0.254: -5.5,-5.5 5.5,-5.5 5.5,5.5 -5.5,5.5 -5.5,-5.5
Top Designator:
  text ".Designator" at -3.432,-0.345 h1.52

## TFBGA-324_12x12mm_Layout18x18_P0.65mm [mm] "TFBGA-324_12x12mm_Layout18x18_P0.65mm"
pads (324):
  round 0.24 smd: A1(-5.525,5.525) A2(-4.875,5.525) A3(-4.225,5.525) A4(-3.575,5.525) A5(-2.925,5.525) A6(-2.275,5.525) A7(-1.625,5.525) A8(-0.975,5.525) A9(-0.325,5.525) A10(0.325,5.525) A11(0.975,5.525) A12(1.625,5.525) A13(2.275,5.525) A14(2.925,5.525) A15(3.575,5.525) A16(4.225,5.525) A17(4.875,5.525) A18(5.525,5.525) B1(-5.525,4.875) B2(-4.875,4.875) B3(-4.225,4.875) B4(-3.575,4.875) B5(-2.925,4.875) B6(-2.275,4.875) B7(-1.625,4.875) B8(-0.975,4.875) B9(-0.325,4.875) B10(0.325,4.875) B11(0.975,4.875) B12(1.625,4.875) B13(2.275,4.875) B14(2.925,4.875) B15(3.575,4.875) B16(4.225,4.875) B17(4.875,4.875) B18(5.525,4.875) C1(-5.525,4.225) C2(-4.875,4.225) C3(-4.225,4.225) C4(-3.575,4.225) C5(-2.925,4.225) C6(-2.275,4.225) C7(-1.625,4.225) C8(-0.975,4.225) C9(-0.325,4.225) C10(0.325,4.225) C11(0.975,4.225) C12(1.625,4.225) C13(2.275,4.225) C14(2.925,4.225) C15(3.575,4.225) C16(4.225,4.225) C17(4.875,4.225) C18(5.525,4.225) D1(-5.525,3.575) D2(-4.875,3.575) D3(-4.225,3.575) D4(-3.575,3.575) D5(-2.925,3.575) D6(-2.275,3.575) D7(-1.625,3.575) D8(-0.975,3.575) D9(-0.325,3.575) D10(0.325,3.575) D11(0.975,3.575) D12(1.625,3.575) D13(2.275,3.575) D14(2.925,3.575) D15(3.575,3.575) D16(4.225,3.575) D17(4.875,3.575) D18(5.525,3.575) E1(-5.525,2.925) E2(-4.875,2.925) E3(-4.225,2.925) E4(-3.575,2.925) E5(-2.925,2.925) E6(-2.275,2.925) E7(-1.625,2.925) E8(-0.975,2.925) E9(-0.325,2.925) E10(0.325,2.925) E11(0.975,2.925) E12(1.625,2.925) E13(2.275,2.925) E14(2.925,2.925) E15(3.575,2.925) E16(4.225,2.925) E17(4.875,2.925) E18(5.525,2.925) F1(-5.525,2.275) F2(-4.875,2.275) F3(-4.225,2.275) F4(-3.575,2.275) F5(-2.925,2.275) F6(-2.275,2.275) F7(-1.625,2.275) F8(-0.975,2.275) F9(-0.325,2.275) F10(0.325,2.275) F11(0.975,2.275) F12(1.625,2.275) F13(2.275,2.275) F14(2.925,2.275) F15(3.575,2.275) F16(4.225,2.275) F17(4.875,2.275) F18(5.525,2.275) G1(-5.525,1.625) G2(-4.875,1.625) G3(-4.225,1.625) G4(-3.575,1.625) G5(-2.925,1.625) G6(-2.275,1.625) G7(-1.625,1.625) G8(-0.975,1.625) G9(-0.325,1.625) G10(0.325,1.625) G11(0.975,1.625) G12(1.625,1.625) G13(2.275,1.625) G14(2.925,1.625) G15(3.575,1.625) G16(4.225,1.625) G17(4.875,1.625) G18(5.525,1.625) H1(-5.525,0.975) H2(-4.875,0.975) H3(-4.225,0.975) H4(-3.575,0.975) H5(-2.925,0.975) H6(-2.275,0.975) H7(-1.625,0.975) H8(-0.975,0.975) H9(-0.325,0.975) H10(0.325,0.975) H11(0.975,0.975) H12(1.625,0.975) H13(2.275,0.975) H14(2.925,0.975) H15(3.575,0.975) H16(4.225,0.975) H17(4.875,0.975) H18(5.525,0.975) J1(-5.525,0.325) J2(-4.875,0.325) J3(-4.225,0.325) J4(-3.575,0.325) J5(-2.925,0.325) J6(-2.275,0.325) J7(-1.625,0.325) J8(-0.975,0.325) J9(-0.325,0.325) J10(0.325,0.325) J11(0.975,0.325) J12(1.625,0.325) J13(2.275,0.325) J14(2.925,0.325) J15(3.575,0.325) J16(4.225,0.325) J17(4.875,0.325) J18(5.525,0.325) K1(-5.525,-0.325) K2(-4.875,-0.325) K3(-4.225,-0.325) K4(-3.575,-0.325) K5(-2.925,-0.325) K6(-2.275,-0.325) K7(-1.625,-0.325) K8(-0.975,-0.325) K9(-0.325,-0.325) K10(0.325,-0.325) K11(0.975,-0.325) K12(1.625,-0.325) K13(2.275,-0.325) K14(2.925,-0.325) K15(3.575,-0.325) K16(4.225,-0.325) K17(4.875,-0.325) K18(5.525,-0.325) L1(-5.525,-0.975) L2(-4.875,-0.975) L3(-4.225,-0.975) L4(-3.575,-0.975) L5(-2.925,-0.975) L6(-2.275,-0.975) L7(-1.625,-0.975) L8(-0.975,-0.975) L9(-0.325,-0.975) L10(0.325,-0.975) L11(0.975,-0.975) L12(1.625,-0.975) L13(2.275,-0.975) L14(2.925,-0.975) L15(3.575,-0.975) L16(4.225,-0.975) L17(4.875,-0.975) L18(5.525,-0.975) M1(-5.525,-1.625) M2(-4.875,-1.625) M3(-4.225,-1.625) M4(-3.575,-1.625) M5(-2.925,-1.625) M6(-2.275,-1.625) M7(-1.625,-1.625) M8(-0.975,-1.625) M9(-0.325,-1.625) M10(0.325,-1.625) M11(0.975,-1.625) M12(1.625,-1.625) M13(2.275,-1.625) M14(2.925,-1.625) M15(3.575,-1.625) M16(4.225,-1.625) M17(4.875,-1.625) M18(5.525,-1.625) N1(-5.525,-2.275) N2(-4.875,-2.275) N3(-4.225,-2.275) N4(-3.575,-2.275) N5(-2.925,-2.275) N6(-2.275,-2.275) N7(-1.625,-2.275) N8(-0.975,-2.275) N9(-0.325,-2.275) N10(0.325,-2.275) N11(0.975,-2.275) N12(1.625,-2.275) N13(2.275,-2.275) N14(2.925,-2.275) N15(3.575,-2.275) N16(4.225,-2.275) N17(4.875,-2.275) N18(5.525,-2.275) P1(-5.525,-2.925) P2(-4.875,-2.925) P3(-4.225,-2.925) P4(-3.575,-2.925) P5(-2.925,-2.925) P6(-2.275,-2.925) P7(-1.625,-2.925) P8(-0.975,-2.925) P9(-0.325,-2.925) P10(0.325,-2.925) P11(0.975,-2.925) P12(1.625,-2.925) P13(2.275,-2.925) P14(2.925,-2.925) P15(3.575,-2.925) P16(4.225,-2.925) P17(4.875,-2.925) P18(5.525,-2.925) R1(-5.525,-3.575) R2(-4.875,-3.575) R3(-4.225,-3.575) R4(-3.575,-3.575) R5(-2.925,-3.575) R6(-2.275,-3.575) R7(-1.625,-3.575) R8(-0.975,-3.575) R9(-0.325,-3.575) R10(0.325,-3.575) R11(0.975,-3.575) R12(1.625,-3.575) R13(2.275,-3.575) R14(2.925,-3.575) R15(3.575,-3.575) R16(4.225,-3.575) R17(4.875,-3.575) R18(5.525,-3.575) T1(-5.525,-4.225) T2(-4.875,-4.225) T3(-4.225,-4.225) T4(-3.575,-4.225) T5(-2.925,-4.225) T6(-2.275,-4.225) T7(-1.625,-4.225) T8(-0.975,-4.225) T9(-0.325,-4.225) T10(0.325,-4.225) T11(0.975,-4.225) T12(1.625,-4.225) T13(2.275,-4.225) T14(2.925,-4.225) T15(3.575,-4.225) T16(4.225,-4.225) T17(4.875,-4.225) T18(5.525,-4.225) U1(-5.525,-4.875) U2(-4.875,-4.875) U3(-4.225,-4.875) U4(-3.575,-4.875) U5(-2.925,-4.875) U6(-2.275,-4.875) U7(-1.625,-4.875) U8(-0.975,-4.875) U9(-0.325,-4.875) U10(0.325,-4.875) U11(0.975,-4.875) U12(1.625,-4.875) U13(2.275,-4.875) U14(2.925,-4.875) U15(3.575,-4.875) U16(4.225,-4.875) U17(4.875,-4.875) U18(5.525,-4.875) V1(-5.525,-5.525) V2(-4.875,-5.525) V3(-4.225,-5.525) V4(-3.575,-5.525) V5(-2.925,-5.525) V6(-2.275,-5.525) V7(-1.625,-5.525) V8(-0.975,-5.525) V9(-0.325,-5.525) V10(0.325,-5.525) V11(0.975,-5.525) V12(1.625,-5.525) V13(2.275,-5.525) V14(2.925,-5.525) V15(3.575,-5.525) V16(4.225,-5.525) V17(4.875,-5.525) V18(5.525,-5.525)
F.SilkS:
  region: -6.11,6.11 -6.61,6.11 -6.11,6.61
  lines w0.254: -6.11,5.11 -6.11,-6.11 6.11,-6.11 6.11,6.11 -5.11,6.11
Top Component Center:
  lines w0.127: -0.127,0 0.127,0 -0.127,0 ; 0,-0.127 0,0.127 0,-0.127
Top Assembly:
  lines w0.254: -6,-6 -6,5 -5,6 6,6 6,-6 -6,-6
Top Courtyard:
  lines w0.254: -7,-7 -7,7 7,7 7,-7 -7,-7
Top Designator:
  text ".Designator" at -3.432,-0.345 h1.52

## TFBGA-361_13x13mm_Layout19x19_P0.65mm [mm] "TFBGA-361_13x13mm_Layout19x19_P0.65mm"
pads (361):
  round 0.28 smd: A1(-5.85,5.85) A2(-5.2,5.85) A3(-4.55,5.85) A4(-3.9,5.85) A5(-3.25,5.85) A6(-2.6,5.85) A7(-1.95,5.85) A8(-1.3,5.85) A9(-0.65,5.85) A10(0,5.85) A11(0.65,5.85) A12(1.3,5.85) A13(1.95,5.85) A14(2.6,5.85) A15(3.25,5.85) A16(3.9,5.85) A17(4.55,5.85) A18(5.2,5.85) A19(5.85,5.85) B1(-5.85,5.2) B2(-5.2,5.2) B3(-4.55,5.2) B4(-3.9,5.2) B5(-3.25,5.2) B6(-2.6,5.2) B7(-1.95,5.2) B8(-1.3,5.2) B9(-0.65,5.2) B10(0,5.2) B11(0.65,5.2) B12(1.3,5.2) B13(1.95,5.2) B14(2.6,5.2) B15(3.25,5.2) B16(3.9,5.2) B17(4.55,5.2) B18(5.2,5.2) B19(5.85,5.2) C1(-5.85,4.55) C2(-5.2,4.55) C3(-4.55,4.55) C4(-3.9,4.55) C5(-3.25,4.55) C6(-2.6,4.55) C7(-1.95,4.55) C8(-1.3,4.55) C9(-0.65,4.55) C10(0,4.55) C11(0.65,4.55) C12(1.3,4.55) C13(1.95,4.55) C14(2.6,4.55) C15(3.25,4.55) C16(3.9,4.55) C17(4.55,4.55) C18(5.2,4.55) C19(5.85,4.55) D1(-5.85,3.9) D2(-5.2,3.9) D3(-4.55,3.9) D4(-3.9,3.9) D5(-3.25,3.9) D6(-2.6,3.9) D7(-1.95,3.9) D8(-1.3,3.9) D9(-0.65,3.9) D10(0,3.9) D11(0.65,3.9) D12(1.3,3.9) D13(1.95,3.9) D14(2.6,3.9) D15(3.25,3.9) D16(3.9,3.9) D17(4.55,3.9) D18(5.2,3.9) D19(5.85,3.9) E1(-5.85,3.25) E2(-5.2,3.25) E3(-4.55,3.25) E4(-3.9,3.25) E5(-3.25,3.25) E6(-2.6,3.25) E7(-1.95,3.25) E8(-1.3,3.25) E9(-0.65,3.25) E10(0,3.25) E11(0.65,3.25) E12(1.3,3.25) E13(1.95,3.25) E14(2.6,3.25) E15(3.25,3.25) E16(3.9,3.25) E17(4.55,3.25) E18(5.2,3.25) E19(5.85,3.25) F1(-5.85,2.6) F2(-5.2,2.6) F3(-4.55,2.6) F4(-3.9,2.6) F5(-3.25,2.6) F6(-2.6,2.6) F7(-1.95,2.6) F8(-1.3,2.6) F9(-0.65,2.6) F10(0,2.6) F11(0.65,2.6) F12(1.3,2.6) F13(1.95,2.6) F14(2.6,2.6) F15(3.25,2.6) F16(3.9,2.6) F17(4.55,2.6) F18(5.2,2.6) F19(5.85,2.6) G1(-5.85,1.95) G2(-5.2,1.95) G3(-4.55,1.95) G4(-3.9,1.95) G5(-3.25,1.95) G6(-2.6,1.95) G7(-1.95,1.95) G8(-1.3,1.95) G9(-0.65,1.95) G10(0,1.95) G11(0.65,1.95) G12(1.3,1.95) G13(1.95,1.95) G14(2.6,1.95) G15(3.25,1.95) G16(3.9,1.95) G17(4.55,1.95) G18(5.2,1.95) G19(5.85,1.95) H1(-5.85,1.3) H2(-5.2,1.3) H3(-4.55,1.3) H4(-3.9,1.3) H5(-3.25,1.3) H6(-2.6,1.3) H7(-1.95,1.3) H8(-1.3,1.3) H9(-0.65,1.3) H10(0,1.3) H11(0.65,1.3) H12(1.3,1.3) H13(1.95,1.3) H14(2.6,1.3) H15(3.25,1.3) H16(3.9,1.3) H17(4.55,1.3) H18(5.2,1.3) H19(5.85,1.3) J1(-5.85,0.65) J2(-5.2,0.65) J3(-4.55,0.65) J4(-3.9,0.65) J5(-3.25,0.65) J6(-2.6,0.65) J7(-1.95,0.65) J8(-1.3,0.65) J9(-0.65,0.65) J10(0,0.65) J11(0.65,0.65) J12(1.3,0.65) J13(1.95,0.65) J14(2.6,0.65) J15(3.25,0.65) J16(3.9,0.65) J17(4.55,0.65) J18(5.2,0.65) J19(5.85,0.65) K1(-5.85,0) K2(-5.2,0) K3(-4.55,0) K4(-3.9,0) K5(-3.25,0) K6(-2.6,0) K7(-1.95,0) K8(-1.3,0) K9(-0.65,0) K10(0,0) K11(0.65,0) K12(1.3,0) K13(1.95,0) K14(2.6,0) K15(3.25,0) K16(3.9,0) K17(4.55,0) K18(5.2,0) K19(5.85,0) L1(-5.85,-0.65) L2(-5.2,-0.65) L3(-4.55,-0.65) L4(-3.9,-0.65) L5(-3.25,-0.65) L6(-2.6,-0.65) L7(-1.95,-0.65) L8(-1.3,-0.65) L9(-0.65,-0.65) L10(0,-0.65) L11(0.65,-0.65) L12(1.3,-0.65) L13(1.95,-0.65) L14(2.6,-0.65) L15(3.25,-0.65) L16(3.9,-0.65) L17(4.55,-0.65) L18(5.2,-0.65) L19(5.85,-0.65) M1(-5.85,-1.3) M2(-5.2,-1.3) M3(-4.55,-1.3) M4(-3.9,-1.3) M5(-3.25,-1.3) M6(-2.6,-1.3) M7(-1.95,-1.3) M8(-1.3,-1.3) M9(-0.65,-1.3) M10(0,-1.3) M11(0.65,-1.3) M12(1.3,-1.3) M13(1.95,-1.3) M14(2.6,-1.3) M15(3.25,-1.3) M16(3.9,-1.3) M17(4.55,-1.3) M18(5.2,-1.3) M19(5.85,-1.3) N1(-5.85,-1.95) N2(-5.2,-1.95) N3(-4.55,-1.95) N4(-3.9,-1.95) N5(-3.25,-1.95) N6(-2.6,-1.95) N7(-1.95,-1.95) N8(-1.3,-1.95) N9(-0.65,-1.95) N10(0,-1.95) N11(0.65,-1.95) N12(1.3,-1.95) N13(1.95,-1.95) N14(2.6,-1.95) N15(3.25,-1.95) N16(3.9,-1.95) N17(4.55,-1.95) N18(5.2,-1.95) N19(5.85,-1.95) P1(-5.85,-2.6) P2(-5.2,-2.6) P3(-4.55,-2.6) P4(-3.9,-2.6) P5(-3.25,-2.6) P6(-2.6,-2.6) P7(-1.95,-2.6) P8(-1.3,-2.6) P9(-0.65,-2.6) P10(0,-2.6) P11(0.65,-2.6) P12(1.3,-2.6) P13(1.95,-2.6) P14(2.6,-2.6) P15(3.25,-2.6) P16(3.9,-2.6) P17(4.55,-2.6) P18(5.2,-2.6) P19(5.85,-2.6) R1(-5.85,-3.25) R2(-5.2,-3.25) R3(-4.55,-3.25) R4(-3.9,-3.25) R5(-3.25,-3.25) R6(-2.6,-3.25) R7(-1.95,-3.25) R8(-1.3,-3.25) R9(-0.65,-3.25) R10(0,-3.25) R11(0.65,-3.25) R12(1.3,-3.25) R13(1.95,-3.25) R14(2.6,-3.25) R15(3.25,-3.25) R16(3.9,-3.25) R17(4.55,-3.25) R18(5.2,-3.25) R19(5.85,-3.25) T1(-5.85,-3.9) T2(-5.2,-3.9) T3(-4.55,-3.9) T4(-3.9,-3.9) T5(-3.25,-3.9) T6(-2.6,-3.9) T7(-1.95,-3.9) T8(-1.3,-3.9) T9(-0.65,-3.9) T10(0,-3.9) T11(0.65,-3.9) T12(1.3,-3.9) T13(1.95,-3.9) T14(2.6,-3.9) T15(3.25,-3.9) T16(3.9,-3.9) T17(4.55,-3.9) T18(5.2,-3.9) T19(5.85,-3.9) U1(-5.85,-4.55) U2(-5.2,-4.55) U3(-4.55,-4.55) U4(-3.9,-4.55) U5(-3.25,-4.55) U6(-2.6,-4.55) U7(-1.95,-4.55) U8(-1.3,-4.55) U9(-0.65,-4.55) U10(0,-4.55) U11(0.65,-4.55) U12(1.3,-4.55) U13(1.95,-4.55) U14(2.6,-4.55) U15(3.25,-4.55) U16(3.9,-4.55) U17(4.55,-4.55) U18(5.2,-4.55) U19(5.85,-4.55) V1(-5.85,-5.2) V2(-5.2,-5.2) V3(-4.55,-5.2) V4(-3.9,-5.2) V5(-3.25,-5.2) V6(-2.6,-5.2) V7(-1.95,-5.2) V8(-1.3,-5.2) V9(-0.65,-5.2) V10(0,-5.2) V11(0.65,-5.2) V12(1.3,-5.2) V13(1.95,-5.2) V14(2.6,-5.2) V15(3.25,-5.2) V16(3.9,-5.2) V17(4.55,-5.2) V18(5.2,-5.2) V19(5.85,-5.2) W1(-5.85,-5.85) W2(-5.2,-5.85) W3(-4.55,-5.85) W4(-3.9,-5.85) W5(-3.25,-5.85) W6(-2.6,-5.85) W7(-1.95,-5.85) W8(-1.3,-5.85) W9(-0.65,-5.85) W10(0,-5.85) W11(0.65,-5.85) W12(1.3,-5.85) W13(1.95,-5.85) W14(2.6,-5.85) W15(3.25,-5.85) W16(3.9,-5.85) W17(4.55,-5.85) W18(5.2,-5.85) W19(5.85,-5.85)
F.SilkS:
  region: -6.61,6.61 -7.11,6.61 -6.61,7.11
  lines w0.254: -6.61,5.61 -6.61,-6.61 6.61,-6.61 6.61,6.61 -5.61,6.61
Top Component Center:
  lines w0.127: -0.127,0 0.127,0 -0.127,0 ; 0,-0.127 0,0.127 0,-0.127
Top Assembly:
  lines w0.254: -6.5,-6.5 -6.5,5.5 -5.5,6.5 6.5,6.5 6.5,-6.5 -6.5,-6.5
Top Courtyard:
  lines w0.254: -7.5,-7.5 -7.5,7.5 7.5,7.5 7.5,-7.5 -7.5,-7.5
Top Designator:
  text ".Designator" at -3.432,-0.345 h1.52

## TFBGA-576_16x16mm_Layout24x24_P0.65mm [mm] "TFBGA-576_16x16mm_Layout24x24_P0.65mm"
pads (576):
  round 0.24 smd: A1(-7.475,7.475) A2(-6.825,7.475) A3(-6.175,7.475) A4(-5.525,7.475) A5(-4.875,7.475) A6(-4.225,7.475) A7(-3.575,7.475) A8(-2.925,7.475) A9(-2.275,7.475) A10(-1.625,7.475) A11(-0.975,7.475) A12(-0.325,7.475) A13(0.325,7.475) A14(0.975,7.475) A15(1.625,7.475) A16(2.275,7.475) A17(2.925,7.475) A18(3.575,7.475) A19(4.225,7.475) A20(4.875,7.475) A21(5.525,7.475) A22(6.175,7.475) A23(6.825,7.475) A24(7.475,7.475) AA1(-7.475,-5.525) AA2(-6.825,-5.525) AA3(-6.175,-5.525) AA4(-5.525,-5.525) AA5(-4.875,-5.525) AA6(-4.225,-5.525) AA7(-3.575,-5.525) AA8(-2.925,-5.525) AA9(-2.275,-5.525) AA10(-1.625,-5.525) AA11(-0.975,-5.525) AA12(-0.325,-5.525) AA13(0.325,-5.525) AA14(0.975,-5.525) AA15(1.625,-5.525) AA16(2.275,-5.525) AA17(2.925,-5.525) AA18(3.575,-5.525) AA19(4.225,-5.525) AA20(4.875,-5.525) AA21(5.525,-5.525) AA22(6.175,-5.525) AA23(6.825,-5.525) AA24(7.475,-5.525) AB1(-7.475,-6.175) AB2(-6.825,-6.175) AB3(-6.175,-6.175) AB4(-5.525,-6.175) AB5(-4.875,-6.175) AB6(-4.225,-6.175) AB7(-3.575,-6.175) AB8(-2.925,-6.175) AB9(-2.275,-6.175) AB10(-1.625,-6.175) AB11(-0.975,-6.175) AB12(-0.325,-6.175) AB13(0.325,-6.175) AB14(0.975,-6.175) AB15(1.625,-6.175) AB16(2.275,-6.175) AB17(2.925,-6.175) AB18(3.575,-6.175) AB19(4.225,-6.175) AB20(4.875,-6.175) AB21(5.525,-6.175) AB22(6.175,-6.175) AB23(6.825,-6.175) AB24(7.475,-6.175) AC1(-7.475,-6.825) AC2(-6.825,-6.825) AC3(-6.175,-6.825) AC4(-5.525,-6.825) AC5(-4.875,-6.825) AC6(-4.225,-6.825) AC7(-3.575,-6.825) AC8(-2.925,-6.825) AC9(-2.275,-6.825) AC10(-1.625,-6.825) AC11(-0.975,-6.825) AC12(-0.325,-6.825) AC13(0.325,-6.825) AC14(0.975,-6.825) AC15(1.625,-6.825) AC16(2.275,-6.825) AC17(2.925,-6.825) AC18(3.575,-6.825) AC19(4.225,-6.825) AC20(4.875,-6.825) AC21(5.525,-6.825) AC22(6.175,-6.825) AC23(6.825,-6.825) AC24(7.475,-6.825) AD1(-7.475,-7.475) AD2(-6.825,-7.475) AD3(-6.175,-7.475) AD4(-5.525,-7.475) AD5(-4.875,-7.475) AD6(-4.225,-7.475) AD7(-3.575,-7.475) AD8(-2.925,-7.475) AD9(-2.275,-7.475) AD10(-1.625,-7.475) AD11(-0.975,-7.475) AD12(-0.325,-7.475) AD13(0.325,-7.475) AD14(0.975,-7.475) AD15(1.625,-7.475) AD16(2.275,-7.475) AD17(2.925,-7.475) AD18(3.575,-7.475) AD19(4.225,-7.475) AD20(4.875,-7.475) AD21(5.525,-7.475) AD22(6.175,-7.475) AD23(6.825,-7.475) AD24(7.475,-7.475) B1(-7.475,6.825) B2(-6.825,6.825) B3(-6.175,6.825) B4(-5.525,6.825) B5(-4.875,6.825) B6(-4.225,6.825) B7(-3.575,6.825) B8(-2.925,6.825) B9(-2.275,6.825) B10(-1.625,6.825) B11(-0.975,6.825) B12(-0.325,6.825) B13(0.325,6.825) B14(0.975,6.825) B15(1.625,6.825) B16(2.275,6.825) B17(2.925,6.825) B18(3.575,6.825) B19(4.225,6.825) B20(4.875,6.825) B21(5.525,6.825) B22(6.175,6.825) B23(6.825,6.825) B24(7.475,6.825) C1(-7.475,6.175) C2(-6.825,6.175) C3(-6.175,6.175) C4(-5.525,6.175) C5(-4.875,6.175) C6(-4.225,6.175) C7(-3.575,6.175) C8(-2.925,6.175) C9(-2.275,6.175) C10(-1.625,6.175) C11(-0.975,6.175) C12(-0.325,6.175) C13(0.325,6.175) C14(0.975,6.175) C15(1.625,6.175) C16(2.275,6.175) C17(2.925,6.175) C18(3.575,6.175) C19(4.225,6.175) C20(4.875,6.175) C21(5.525,6.175) C22(6.175,6.175) C23(6.825,6.175) C24(7.475,6.175) D1(-7.475,5.525) D2(-6.825,5.525) D3(-6.175,5.525) D4(-5.525,5.525) D5(-4.875,5.525) D6(-4.225,5.525) D7(-3.575,5.525) D8(-2.925,5.525) D9(-2.275,5.525) D10(-1.625,5.525) D11(-0.975,5.525) D12(-0.325,5.525) D13(0.325,5.525) D14(0.975,5.525) D15(1.625,5.525) D16(2.275,5.525) D17(2.925,5.525) D18(3.575,5.525) D19(4.225,5.525) D20(4.875,5.525) D21(5.525,5.525) D22(6.175,5.525) D23(6.825,5.525) D24(7.475,5.525) E1(-7.475,4.875) E2(-6.825,4.875) E3(-6.175,4.875) E4(-5.525,4.875) E5(-4.875,4.875) E6(-4.225,4.875) E7(-3.575,4.875) E8(-2.925,4.875) E9(-2.275,4.875) E10(-1.625,4.875) E11(-0.975,4.875) E12(-0.325,4.875) E13(0.325,4.875) E14(0.975,4.875) E15(1.625,4.875) E16(2.275,4.875) E17(2.925,4.875) E18(3.575,4.875) E19(4.225,4.875) E20(4.875,4.875) E21(5.525,4.875) E22(6.175,4.875) E23(6.825,4.875) E24(7.475,4.875) F1(-7.475,4.225) F2(-6.825,4.225) F3(-6.175,4.225) F4(-5.525,4.225) F5(-4.875,4.225) F6(-4.225,4.225) F7(-3.575,4.225) F8(-2.925,4.225) F9(-2.275,4.225) F10(-1.625,4.225) F11(-0.975,4.225) F12(-0.325,4.225) F13(0.325,4.225) F14(0.975,4.225) F15(1.625,4.225) F16(2.275,4.225) F17(2.925,4.225) F18(3.575,4.225) F19(4.225,4.225) F20(4.875,4.225) F21(5.525,4.225) F22(6.175,4.225) F23(6.825,4.225) F24(7.475,4.225) G1(-7.475,3.575) G2(-6.825,3.575) G3(-6.175,3.575) G4(-5.525,3.575) G5(-4.875,3.575) G6(-4.225,3.575) G7(-3.575,3.575) G8(-2.925,3.575) G9(-2.275,3.575) G10(-1.625,3.575) G11(-0.975,3.575) G12(-0.325,3.575) G13(0.325,3.575) G14(0.975,3.575) G15(1.625,3.575) G16(2.275,3.575) G17(2.925,3.575) G18(3.575,3.575) G19(4.225,3.575) G20(4.875,3.575) G21(5.525,3.575) G22(6.175,3.575) G23(6.825,3.575) G24(7.475,3.575) H1(-7.475,2.925) H2(-6.825,2.925) H3(-6.175,2.925) H4(-5.525,2.925) H5(-4.875,2.925) H6(-4.225,2.925) H7(-3.575,2.925) H8(-2.925,2.925) H9(-2.275,2.925) H10(-1.625,2.925) H11(-0.975,2.925) H12(-0.325,2.925) H13(0.325,2.925) H14(0.975,2.925) H15(1.625,2.925) H16(2.275,2.925) H17(2.925,2.925) H18(3.575,2.925) H19(4.225,2.925) H20(4.875,2.925) H21(5.525,2.925) H22(6.175,2.925) H23(6.825,2.925) H24(7.475,2.925) J1(-7.475,2.275) J2(-6.825,2.275) J3(-6.175,2.275) J4(-5.525,2.275) J5(-4.875,2.275) J6(-4.225,2.275) J7(-3.575,2.275) J8(-2.925,2.275) J9(-2.275,2.275) J10(-1.625,2.275) J11(-0.975,2.275) J12(-0.325,2.275) J13(0.325,2.275) J14(0.975,2.275) J15(1.625,2.275) J16(2.275,2.275) J17(2.925,2.275) J18(3.575,2.275) J19(4.225,2.275) J20(4.875,2.275) J21(5.525,2.275) J22(6.175,2.275) J23(6.825,2.275) J24(7.475,2.275) K1(-7.475,1.625) K2(-6.825,1.625) K3(-6.175,1.625) K4(-5.525,1.625) K5(-4.875,1.625) K6(-4.225,1.625) K7(-3.575,1.625) K8(-2.925,1.625) K9(-2.275,1.625) K10(-1.625,1.625) K11(-0.975,1.625) K12(-0.325,1.625) K13(0.325,1.625) K14(0.975,1.625) K15(1.625,1.625) K16(2.275,1.625) K17(2.925,1.625) K18(3.575,1.625) K19(4.225,1.625) K20(4.875,1.625) K21(5.525,1.625) K22(6.175,1.625) K23(6.825,1.625) K24(7.475,1.625) L1(-7.475,0.975) L2(-6.825,0.975) L3(-6.175,0.975) L4(-5.525,0.975) L5(-4.875,0.975) L6(-4.225,0.975) L7(-3.575,0.975) L8(-2.925,0.975) L9(-2.275,0.975) L10(-1.625,0.975) L11(-0.975,0.975) L12(-0.325,0.975) L13(0.325,0.975) L14(0.975,0.975) L15(1.625,0.975) L16(2.275,0.975) L17(2.925,0.975) L18(3.575,0.975) L19(4.225,0.975) L20(4.875,0.975) L21(5.525,0.975) L22(6.175,0.975) L23(6.825,0.975) L24(7.475,0.975) M1(-7.475,0.325) M2(-6.825,0.325) M3(-6.175,0.325) M4(-5.525,0.325) M5(-4.875,0.325) M6(-4.225,0.325) M7(-3.575,0.325) M8(-2.925,0.325) M9(-2.275,0.325) M10(-1.625,0.325) M11(-0.975,0.325) M12(-0.325,0.325) M13(0.325,0.325) M14(0.975,0.325) M15(1.625,0.325) M16(2.275,0.325) M17(2.925,0.325) M18(3.575,0.325) M19(4.225,0.325) M20(4.875,0.325) M21(5.525,0.325) M22(6.175,0.325) M23(6.825,0.325) M24(7.475,0.325) N1(-7.475,-0.325) N2(-6.825,-0.325) N3(-6.175,-0.325) N4(-5.525,-0.325) N5(-4.875,-0.325) N6(-4.225,-0.325) N7(-3.575,-0.325) N8(-2.925,-0.325) N9(-2.275,-0.325) N10(-1.625,-0.325) N11(-0.975,-0.325) N12(-0.325,-0.325) N13(0.325,-0.325) N14(0.975,-0.325) N15(1.625,-0.325) N16(2.275,-0.325) N17(2.925,-0.325) N18(3.575,-0.325) N19(4.225,-0.325) N20(4.875,-0.325) N21(5.525,-0.325) N22(6.175,-0.325) N23(6.825,-0.325) N24(7.475,-0.325) P1(-7.475,-0.975) P2(-6.825,-0.975) P3(-6.175,-0.975) P4(-5.525,-0.975) P5(-4.875,-0.975) P6(-4.225,-0.975) P7(-3.575,-0.975) P8(-2.925,-0.975) P9(-2.275,-0.975) P10(-1.625,-0.975) P11(-0.975,-0.975) P12(-0.325,-0.975) P13(0.325,-0.975) P14(0.975,-0.975) P15(1.625,-0.975) P16(2.275,-0.975) P17(2.925,-0.975) P18(3.575,-0.975) P19(4.225,-0.975) P20(4.875,-0.975) P21(5.525,-0.975) P22(6.175,-0.975) P23(6.825,-0.975) P24(7.475,-0.975) R1(-7.475,-1.625) R2(-6.825,-1.625) R3(-6.175,-1.625) R4(-5.525,-1.625) R5(-4.875,-1.625) R6(-4.225,-1.625) R7(-3.575,-1.625) R8(-2.925,-1.625) R9(-2.275,-1.625) R10(-1.625,-1.625) R11(-0.975,-1.625) R12(-0.325,-1.625) R13(0.325,-1.625) R14(0.975,-1.625) R15(1.625,-1.625) R16(2.275,-1.625) R17(2.925,-1.625) R18(3.575,-1.625) R19(4.225,-1.625) R20(4.875,-1.625) R21(5.525,-1.625) R22(6.175,-1.625) R23(6.825,-1.625) R24(7.475,-1.625) T1(-7.475,-2.275) T2(-6.825,-2.275) T3(-6.175,-2.275) T4(-5.525,-2.275) T5(-4.875,-2.275) T6(-4.225,-2.275) T7(-3.575,-2.275) T8(-2.925,-2.275) T9(-2.275,-2.275) T10(-1.625,-2.275) T11(-0.975,-2.275) T12(-0.325,-2.275) T13(0.325,-2.275) T14(0.975,-2.275) T15(1.625,-2.275) T16(2.275,-2.275) T17(2.925,-2.275) T18(3.575,-2.275) T19(4.225,-2.275) T20(4.875,-2.275) T21(5.525,-2.275) T22(6.175,-2.275) T23(6.825,-2.275) T24(7.475,-2.275) U1(-7.475,-2.925) U2(-6.825,-2.925) U3(-6.175,-2.925) U4(-5.525,-2.925) U5(-4.875,-2.925) U6(-4.225,-2.925) U7(-3.575,-2.925) U8(-2.925,-2.925) U9(-2.275,-2.925) U10(-1.625,-2.925) U11(-0.975,-2.925) U12(-0.325,-2.925) U13(0.325,-2.925) U14(0.975,-2.925) U15(1.625,-2.925) U16(2.275,-2.925) U17(2.925,-2.925) U18(3.575,-2.925) U19(4.225,-2.925) U20(4.875,-2.925) U21(5.525,-2.925) U22(6.175,-2.925) U23(6.825,-2.925) U24(7.475,-2.925) V1(-7.475,-3.575) V2(-6.825,-3.575) V3(-6.175,-3.575) V4(-5.525,-3.575) V5(-4.875,-3.575) V6(-4.225,-3.575) V7(-3.575,-3.575) V8(-2.925,-3.575) V9(-2.275,-3.575) V10(-1.625,-3.575) V11(-0.975,-3.575) V12(-0.325,-3.575) V13(0.325,-3.575) V14(0.975,-3.575) V15(1.625,-3.575) V16(2.275,-3.575) V17(2.925,-3.575) V18(3.575,-3.575) V19(4.225,-3.575) V20(4.875,-3.575) V21(5.525,-3.575) V22(6.175,-3.575) V23(6.825,-3.575) V24(7.475,-3.575) W1(-7.475,-4.225) W2(-6.825,-4.225) W3(-6.175,-4.225) W4(-5.525,-4.225) W5(-4.875,-4.225) W6(-4.225,-4.225) W7(-3.575,-4.225) W8(-2.925,-4.225) W9(-2.275,-4.225) W10(-1.625,-4.225) W11(-0.975,-4.225) W12(-0.325,-4.225) W13(0.325,-4.225) W14(0.975,-4.225) W15(1.625,-4.225) W16(2.275,-4.225) W17(2.925,-4.225) W18(3.575,-4.225) W19(4.225,-4.225) W20(4.875,-4.225) W21(5.525,-4.225) W22(6.175,-4.225) W23(6.825,-4.225) W24(7.475,-4.225) Y1(-7.475,-4.875) Y2(-6.825,-4.875) Y3(-6.175,-4.875) Y4(-5.525,-4.875) Y5(-4.875,-4.875) Y6(-4.225,-4.875) Y7(-3.575,-4.875) Y8(-2.925,-4.875) Y9(-2.275,-4.875) Y10(-1.625,-4.875) Y11(-0.975,-4.875) Y12(-0.325,-4.875) Y13(0.325,-4.875) Y14(0.975,-4.875) Y15(1.625,-4.875) Y16(2.275,-4.875) Y17(2.925,-4.875) Y18(3.575,-4.875) Y19(4.225,-4.875) Y20(4.875,-4.875) Y21(5.525,-4.875) Y22(6.175,-4.875) Y23(6.825,-4.875) Y24(7.475,-4.875)
F.SilkS:
  region: -8.11,8.11 -8.61,8.11 -8.11,8.61
  lines w0.254: -8.11,7.11 -8.11,-8.11 8.11,-8.11 8.11,8.11 -7.11,8.11
Top Component Center:
  lines w0.127: -0.127,0 0.127,0 -0.127,0 ; 0,-0.127 0,0.127 0,-0.127
Top Assembly:
  lines w0.254: -8,-8 8,-8 8,8 -7,8 -8,7 -8,-8
Top Courtyard:
  lines w0.254: -9,-9 9,-9 9,9 -9,9 -9,-9
Top Designator:
  text ".Designator" at -3.432,-0.345 h1.52